# Altium schematic symbol library 502494-0270.SchLib: 1 symbol
Pins are listed as number, name and electrical type; pins without a type are passive.

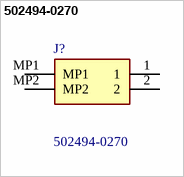
[diagram p0: symbol 502494-0270]

## 502494-0270
designator J?
Headers & Wire Housings 2.0 W/B Sgl R/A Rec Asy 2Ckt Embs Tp Pkg; Manufacturer_Name: Molex; Geometry.Height: 6.85mm; Mouser Part Number: 538-502494-0270; Mouser Price/Stock: https://www.mouser.co.uk/ProductDetail/Molex/502494-0270?qs=sccQW%252BrT69bVmCdKb5dQ%2FA%3D%3D; Manufacturer_Part_Number: 502494-0270; Datasheet Link: https://componentsearchengine.com/Datasheets/1/502494-0270.pdf
footprint 5024940270
pins: 1, 2, MP1, MP2